# Altium schematic symbol library TAJB226K010RNJ.SchLib: 1 symbol
Pins are listed as number, name and electrical type; pins without a type are passive.

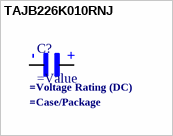
[diagram p0: symbol TAJB226K010RNJ]

## TAJB226K010RNJ
designator C?
Cap Tant Solid 22uF 10V B CASE 10% (3.5 X 2.8 X 1.9mm) Inward L SMD 3528-21 2.4 Ohm 125Â°C T/R; MF: KYOCERA AVX Components Corporation; MP: TAJB226K010RNJ; SnapEDA_Link: https://www.snapeda.com/parts/TAJB226K010RNJ/Kyocera/view-part/?ref=snap; Check_prices: https://www.snapeda.com/parts/TAJB226K010RNJ/Kyocera/view-part/?ref=eda; .Case/Package: =Case/Package; .Voltage Rating (DC): =Voltage Rating (DC)
footprint CAPPC3528X210N
pins: 1, 2
text: -; +